# Altium footprint library PcbLib1.PcbLib: 4 footprints
Each footprint in its own frame and in the unit in brackets; x right, y up, seen from the top. Pads: shape width x height; smd on the part's side, far side on the other; paste and mask are expansions set on the pad; w line width, h text height; cw(c..) or ccw(c..) is an arc to the next point about the centre after c.
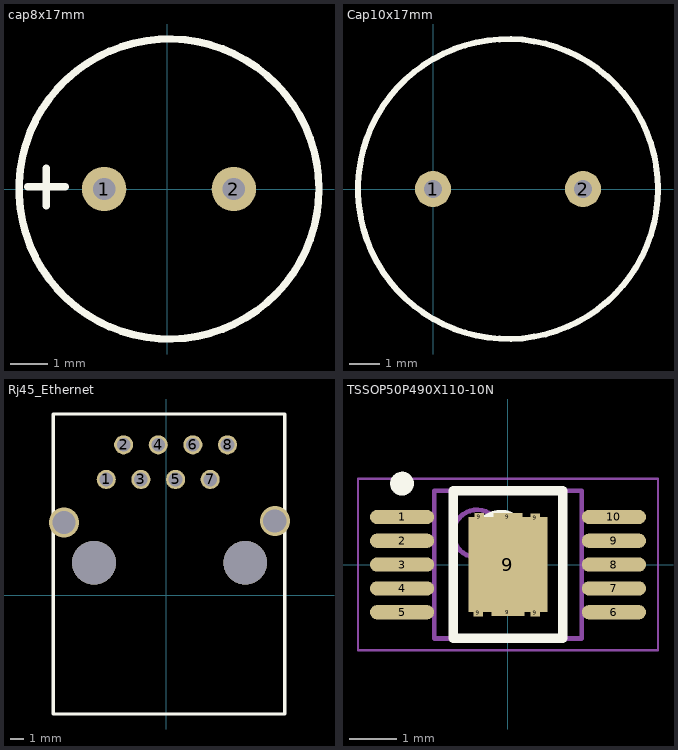
[diagram p0: the footprints below, top view; thin cyan lines are the x and y axes]

## cap8x17mm [mm]
pads (2):
  round 1.2 hole 0.6: 1(-1.7,0) 2(1.8,0)
Top Overlay:
  circle w0.2: c0.05,0 r4.05
  lines w0.2: -3.768,0.06 -2.752,0.06 ; -3.26,-0.448 -3.26,0.568
3D body "Cap-EL(8x12-3_5)T.step": height 12.3, standoff -3.3, extent -3.96,-3.988 4.042,4.008

## Cap10x17mm [mm]
pads (2):
  round 1.2 hole 0.6: 1(0,0) 2(5,0)
Top Overlay:
  circle w0.2: c2.5,0 r5
3D body: height 5.82, standoff -3.28, extent -0.25,-0.25 0.25,0.25
3D body: height 5.82, standoff -3.28, extent 4.75,-0.25 5.25,0.25
3D body: height 17.2, standoff 0.2, extent -2.5,-5 7.5,5

## Rj45_Ethernet [mm]
pads (8):
  round 1.4 hole 1: 1(-4.4,8.5) 2(-3.13,11.04) 3(-1.86,8.5) 4(-0.59,11.04) 5(0.68,8.5) 6(1.95,11.04) 7(3.22,8.5) 8(4.49,11.04)
via -5.3,2.4 diameter 3.2 hole 3.2
via 5.8,2.4 diameter 3.2 hole 3.2
via -7.5,5.35 diameter 2.2 hole 1.7
via 7.96,5.45 diameter 2.2 hole 1.7
Top Overlay:
  lines w0.254: -8.3,-8.7 8.7,-8.7 8.7,13.3 -8.1,13.3 -8.3,13.3 -8.3,-8.7
3D body "User Library-RMS-001L-08A0-GY.STEP": height 13, standoff -3.8, extent -7.8,-8.5 8.2,12.8

## TSSOP50P490X110-10N [mm] "TSSOP, 10-Leads, Body 3,00x3,00mm, Pitch 0,50mm, IPC Medium Density"
height 1.1
pads (17):
  oval 1.35x0.3 smd: 1(-2.225,1) 2(-2.225,0.5) 3(-2.225,0) 4(-2.225,-0.5) 5(-2.225,-1) 6(2.225,-1) 7(2.225,-0.5) 8(2.225,0) 9(2.225,0.5) 10(2.225,1)
  rect 0.2x0.16 smd: 9(-0.624,-1.012) 9(-0.6,1) 9(0.576,-1.012) 9(0.576,0.988)
  rect 0.7x0.16 smd: 9(0,-1)
  rect 1.65x2 smd: 9(0,0)
  rect 0.61x0.16 smd: 9(0,1)
Top Overlay:
  circle w0.6: c-0.15,0.55 r0.3
  circle w0.25: c-2.225,1.7 r0.125
  lines w0.2: -1.15,-1.55 1.15,-1.55 1.15,1.55 -1.15,1.55 -1.15,-1.55
Mechanical 13:
  circle w0.1: c-0.65,0.65 r0.5
  lines w0.1: -1.55,-1.55 1.55,-1.55 1.55,1.55 -1.55,1.55 -1.55,-1.55
Mechanical 15:
  lines w0.05: -3.15,-1.8 3.15,-1.8 3.15,1.8 -3.15,1.8 -3.15,-1.8
  lines w0.1: -0.5,0 0.5,0 ; 0,-0.5 0,0.5
3D body: height 1.1, standoff 0.15, extent -1.55,-1.55 1.55,1.55